# Altium footprint library FootPrintLib_0.PcbLib: 266 footprints (part 10 of 17)
Each footprint in its own frame and in the unit in brackets; x right, y up, seen from the top. Pads: shape width x height; smd on the part's side, far side on the other; paste and mask are expansions set on the pad; w line width, h text height; cw(c..) or ccw(c..) is an arc to the next point about the centre after c.
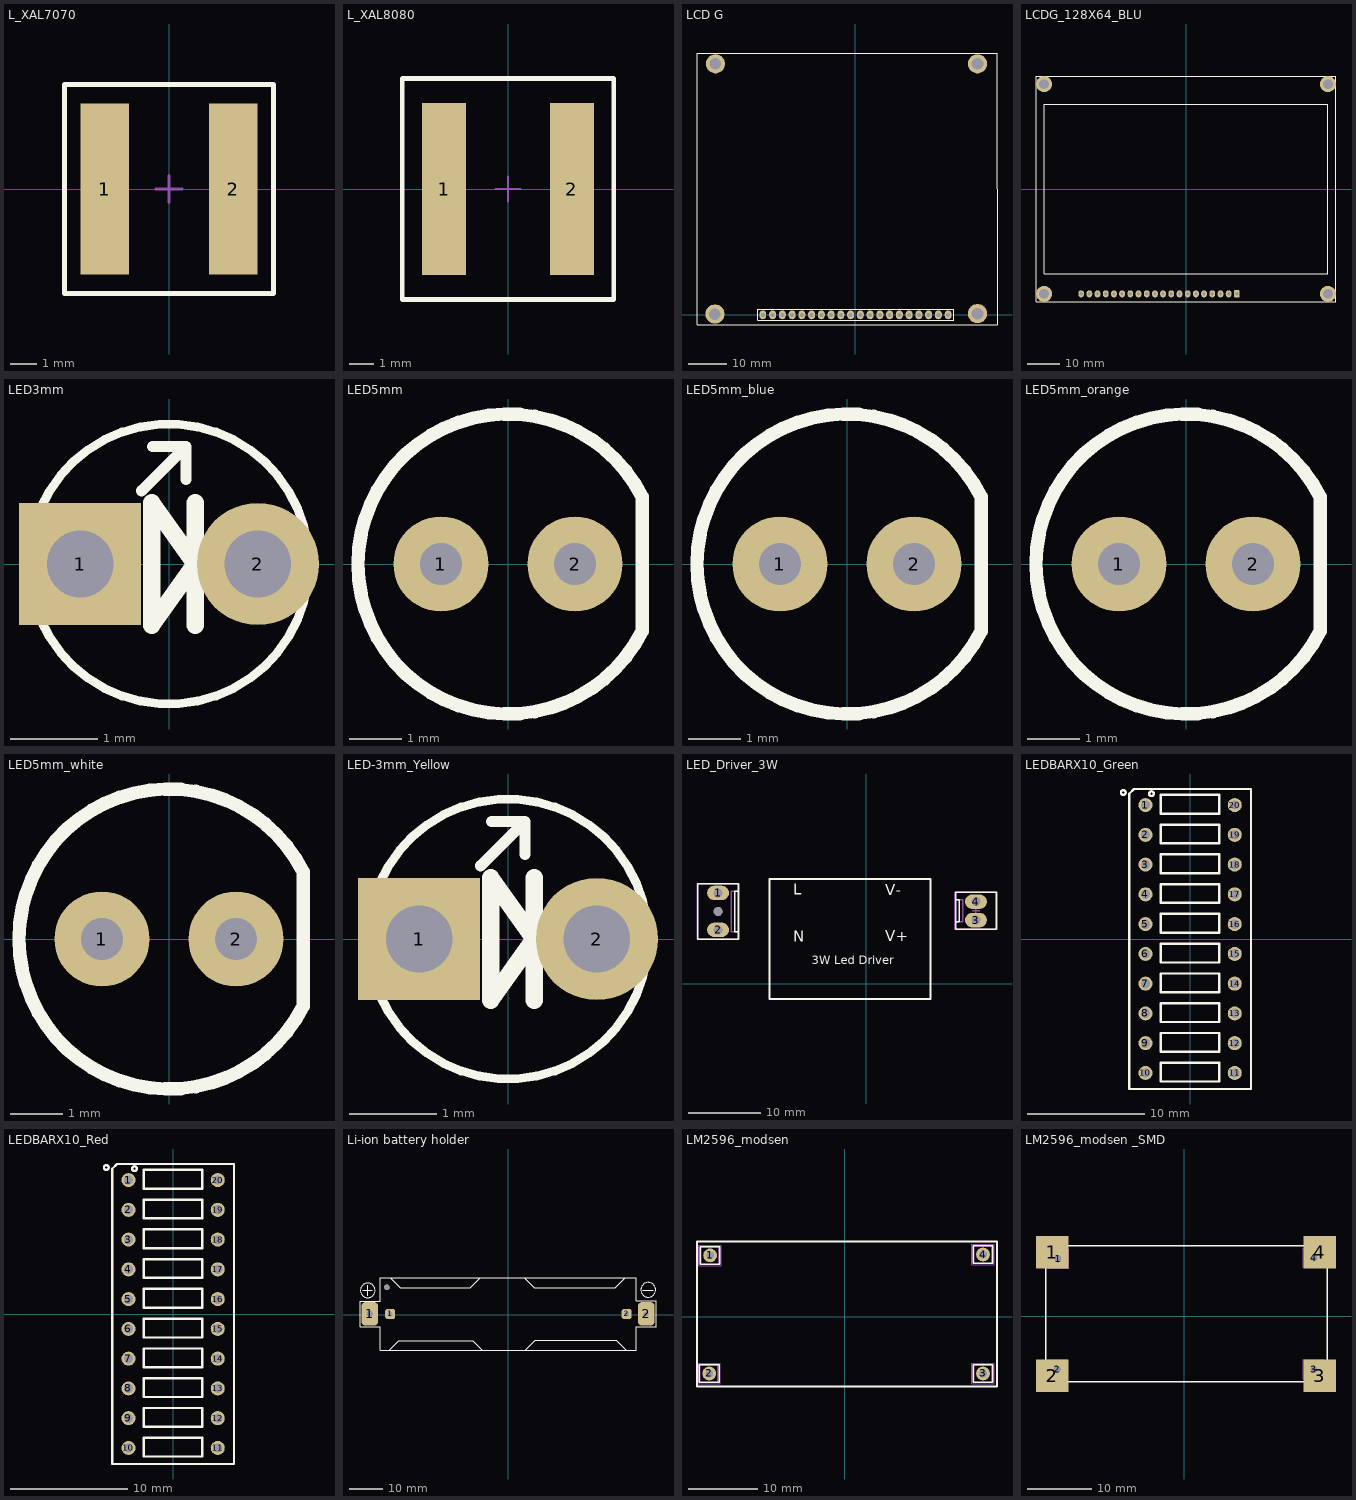
[diagram p9: the footprints below, top view; thin cyan lines are the x and y axes]

## L_XAL7070 [mm] "Inductor, XAL7070, 7.5x7.5x7.0mm"
height 7
pads (2):
  rect 1.8x6.4 smd: 1(-2.4,0) 2(2.4,0)
Top Overlay:
  lines w0.2: -3.9,-3.9 3.9,-3.9 3.9,3.9 -3.9,3.9 -3.9,-3.9
Mechanical 13:
  lines w0.1: -0.5,0 0.5,0 ; 0,-0.5 0,0.5
3D body "Coilcraft-XAL7070.step": height 7, standoff 0, extent -3.85,-4 3.85,4

## L_XAL8080 [mm] "Inductor, XAL8080, 8.1x8.6x8mm"
height 8
pads (2):
  rect 1.8x7 smd: 1(-2.6,0) 2(2.6,0)
Top Overlay:
  lines w0.2: -4.3,-4.5 4.3,-4.5 4.3,4.5 -4.3,4.5 -4.3,-4.5
Mechanical 13:
  lines w0.1: -0.5,0 0.5,0 ; 0,-0.5 0,0.5
3D body "Coilcraft-XAL8080.step": height 8, standoff 0, extent -4.15,-4.4 4.15,4.4

## LCD G [mil]
pads (24):
  oval 70x90 hole 39.37: 1(-950,0) 2(-850,0) 3(-750,0) 4(-650,0) 5(-550,0) 6(-450,0) 7(-350,0) 8(-250,0) 9(-150,0) 10(-50,0) 11(50,0) 12(150,0) 13(250,0) 14(350,0) 15(450,0) 16(550,0) 17(650,0) 18(750,0) 19(850,0) 20(950,0)
  round 196.85 hole 118.11: ""(-1441,8) ""(-1436,2574) ""(1251,13) ""(1251,2574)
Top Overlay:
  lines w7.87: -1000,-55 -1000,55 1005,55 1005,-55 -1000,-55
  lines w10: -1625,-101 1451,-101 1451,2682 -1625,2682 -1625,-101
3D body "User Library-LCD128x64.step": height 566.93, standoff 149.61, extent -1624.69,-87.48 1446.18,2668.42

## LCDG_128X64_BLU [mm] "LCD Graphic Disp, 128X64, TS12864A-2"
pads (24):
  rrect50% 1.8x2.4 hole 1: 1(15.76,-32.5)
  oval 1.8x2.2 hole 1: 2(13.22,-32.5) 3(10.68,-32.5) 4(8.14,-32.5) 5(5.6,-32.5) 6(3.06,-32.5) 7(0.52,-32.5) 8(-2.02,-32.5) 9(-4.56,-32.5) 10(-7.1,-32.5) 11(-9.64,-32.5) 12(-12.18,-32.5) 13(-14.72,-32.5) 14(-17.26,-32.5) 15(-19.8,-32.5) 16(-22.34,-32.5) 17(-24.88,-32.5) 18(-27.42,-32.5) 19(-29.96,-32.5) 20(-32.5,-32.5)
  round 5 hole 3: ""(-44,-32.5) ""(-44,32.5) ""(44,-32.5) ""(44,32.5)
Top Overlay:
  lines w0.2: -46.5,-35 46.5,-35 46.5,35 -46.5,35 -46.5,-35 ; -44,-26.25 44,-26.25 44,26.25 -44,26.25 -44,-26.25
3D body "User Library-WG12864A-1.step": height 14.6, standoff 1, extent -46.5,-35 46.5,35

## LED3mm [mil]
height 157.48
pads (2):
  rect 55x55 hole 30: 1(-40,0)
  round 55 hole 30: 2(40,0)
Top Overlay:
  circle w3.94: c0,0 r62.99
  lines w5: -12.4,32.95 7.6,52.95 ; -7.4,52.95 7.6,52.95 ; 7.6,37.95 7.6,52.95
  lines w7.87: 11.81,-27.56 11.81,27.56 ; -7.87,-27.56 -7.87,27.56 11.81,0 -7.87,-27.56

## LED5mm [mm]
pads (2):
  round 1.8 hole 0.8: 1(-1.27,0) 2(1.27,0)
Top Overlay:
  lines w0.254: 2.54,-1.27 cw(c0,0) 2.54,1.27 2.54,-1.27

## LED5mm_blue [mm]
pads (2):
  round 1.8 hole 0.8: 1(-1.27,0) 2(1.27,0)
Top Overlay:
  lines w0.254: 2.54,-1.27 cw(c0,0) 2.54,1.27 2.54,-1.27
3D body "User Library-LED 5mm Blue.STEP": height 8.72, standoff -2.98, extent -2.758,-2.904 2.642,2.896

## LED5mm_orange [mm]
pads (2):
  round 1.8 hole 0.8: 1(-1.27,0) 2(1.27,0)
Top Overlay:
  lines w0.254: 2.54,-1.27 cw(c0,0) 2.54,1.27 2.54,-1.27
3D body "User Library-LEDd5O.STEP": height 8.66, standoff -6.14, extent -2.753,-3.022 2.667,2.997

## LED5mm_white [mm]
pads (2):
  round 1.8 hole 0.8: 1(-1.27,0) 2(1.27,0)
Top Overlay:
  lines w0.254: 2.54,-1.27 cw(c0,0) 2.54,1.27 2.54,-1.27
3D body "LED.STEP": height 8.35, standoff -6.9, extent -2.772,-2.924 2.678,2.975

## LED-3mm_Yellow [mil]
height 157.48
pads (2):
  rect 55x55 hole 30: 1(-40,0)
  round 55 hole 30: 2(40,0)
Top Overlay:
  circle w3.94: c0,0 r62.99
  lines w5: -12.4,32.95 7.6,52.95 ; -7.4,52.95 7.6,52.95 ; 7.6,37.95 7.6,52.95
  lines w7.87: 11.81,-27.56 11.81,27.56 ; -7.87,-27.56 -7.87,27.56 11.81,0 -7.87,-27.56
3D body "everlight-3MM-LED-YELLOW.step": height 221.91, standoff -272.88, extent -74.8,-79.8 60.07,69.8

## LED_Driver_3W [mm]
pads (5):
  oval 3x2 hole 1.2: 1(-20.398,12.464) 2(-20.398,7.384) 3(15.062,8.738) 4(15.062,11.278)
  round 1.2 hole 1.2: ""(-20.398,9.924)
Top Overlay:
  lines w0.2: -17.604,7.13 -18.112,7.13 -18.112,12.718 -17.604,12.718 ; 12.268,8.484 12.776,8.484 12.776,11.532 12.268,11.532 ; -23.192,6.114 -23.192,13.734 -17.604,13.734 -17.604,6.114 -23.192,6.114 ; 12.268,7.468 17.856,7.468 17.856,12.548 12.268,12.548 12.268,7.468
  lines w0.254: -13.31,-2.108 -13.31,14.376 -2.87,14.376 8.814,14.376 8.814,-2.108 -13.31,-2.108
  text "V+" at 2.591,5.817 h1.52
  text "V-" at 2.591,12.167 h1.52
  text "N" at -10.084,5.766 h1.52
  text "L" at -10.084,12.217 h1.52
  text "3W Led Driver" at -7.491,2.219 h2
Mechanical 13:
  lines w0.2: -17.498,7.13 -18.62,7.13 -18.62,12.718 -17.498,12.718 ; 12.162,8.484 13.284,8.484 13.284,11.532 12.162,11.532 ; -23.298,6.114 -23.298,13.734 -17.498,13.734 -17.498,6.114 -23.298,6.114 ; 12.162,7.468 17.962,7.468 17.962,12.548 12.162,12.548 12.162,7.468
Mechanical 15:
  lines w0.2: -20.906,9.924 -19.89,9.924 ; -20.398,9.416 -20.398,10.432 ; 14.554,10.008 15.57,10.008 ; 15.062,9.5 15.062,10.516
3D body "MOLEX KK 022272021.STEP": height 11.7, standoff -3.56, extent 12.162,7.468 17.962,12.548
3D body "MOLEX KK 022272031.STEP": height 11.7, standoff -3.56, extent -23.298,6.114 -17.498,13.734

## LEDBARX10_Green [mm] "LED BAR GRAPH, pitch: 2.54mm,  CLSRD10A SSA-LXB10HW-GF"
pads (20):
  round 1.2 / inner round 1.2 / far side oval 2x1.2 hole 0.8: 1(-3.81,11.43) 2(-3.81,8.89) 3(-3.81,6.35) 4(-3.81,3.81) 5(-3.81,1.27) 6(-3.81,-1.27) 7(-3.81,-3.81) 8(-3.81,-6.35) 9(-3.81,-8.89) 10(-3.81,-11.43) 11(3.81,-11.43) 12(3.81,-8.89) 13(3.81,-6.35) 14(3.81,-3.81) 15(3.81,-1.27) 16(3.81,1.27) 17(3.81,3.81) 18(3.81,6.35) 19(3.81,8.89) 20(3.81,11.43)
Top Overlay:
  circle w0.2: c-5.7,12.5 r0.2
  circle w0.2: c-3.3,12.4 r0.2
  lines w0.2: -5.2,-12.8 -5.2,12.4 -4.8,12.8 5.2,12.8 5.2,-12.8 -5.2,-12.8 ; -2.5,-12.16 2.5,-12.16 2.5,-10.56 -2.5,-10.56 -2.5,-12.16 ; -2.5,-9.62 2.5,-9.62 2.5,-8.02 -2.5,-8.02 -2.5,-9.62 ; -2.5,-7.08 2.5,-7.08 2.5,-5.48 -2.5,-5.48 -2.5,-7.08 ; -2.5,-4.54 2.5,-4.54 2.5,-2.94 -2.5,-2.94 -2.5,-4.54 ; -2.5,-2 2.5,-2 2.5,-0.4 -2.5,-0.4 -2.5,-2 ; -2.5,0.54 2.5,0.54 2.5,2.14 -2.5,2.14 -2.5,0.54 ; -2.5,3.08 2.5,3.08 2.5,4.68 -2.5,4.68 -2.5,3.08 ; -2.5,5.62 2.5,5.62 2.5,7.22 -2.5,7.22 -2.5,5.62 ; -2.5,8.16 2.5,8.16 2.5,9.76 -2.5,9.76 -2.5,8.16 ; -2.5,10.7 -2.5,12.3 2.5,12.3 2.5,10.7 -2.5,10.7
3D body "LED Bar Graph Green HDSP-4850.step": height 6.1, standoff -2, extent -5.054,-13.182 5.106,12.978

## LEDBARX10_Red [mm] "LED BAR GRAPH, pitch: 2.54mm,  CLSRD10A SSA-LXB10HW-GF"
pads (20):
  round 1.2 / inner round 1.2 / far side oval 2x1.2 hole 0.8: 1(-3.81,11.43) 2(-3.81,8.89) 3(-3.81,6.35) 4(-3.81,3.81) 5(-3.81,1.27) 6(-3.81,-1.27) 7(-3.81,-3.81) 8(-3.81,-6.35) 9(-3.81,-8.89) 10(-3.81,-11.43) 11(3.81,-11.43) 12(3.81,-8.89) 13(3.81,-6.35) 14(3.81,-3.81) 15(3.81,-1.27) 16(3.81,1.27) 17(3.81,3.81) 18(3.81,6.35) 19(3.81,8.89) 20(3.81,11.43)
Top Overlay:
  circle w0.2: c-3.3,12.4 r0.2
  circle w0.2: c-5.7,12.5 r0.2
  lines w0.2: -5.2,-12.8 5.2,-12.8 5.2,12.8 -4.8,12.8 -5.2,12.4 -5.2,-12.8 ; -2.5,-12.16 -2.5,-10.56 2.5,-10.56 2.5,-12.16 -2.5,-12.16 ; -2.5,-9.62 -2.5,-8.02 2.5,-8.02 2.5,-9.62 -2.5,-9.62 ; -2.5,-7.08 -2.5,-5.48 2.5,-5.48 2.5,-7.08 -2.5,-7.08 ; -2.5,-4.54 -2.5,-2.94 2.5,-2.94 2.5,-4.54 -2.5,-4.54 ; -2.5,-2 -2.5,-0.4 2.5,-0.4 2.5,-2 -2.5,-2 ; -2.5,0.54 -2.5,2.14 2.5,2.14 2.5,0.54 -2.5,0.54 ; -2.5,3.08 -2.5,4.68 2.5,4.68 2.5,3.08 -2.5,3.08 ; -2.5,5.62 -2.5,7.22 2.5,7.22 2.5,5.62 -2.5,5.62 ; -2.5,8.16 -2.5,9.76 2.5,9.76 2.5,8.16 -2.5,8.16 ; -2.5,10.7 2.5,10.7 2.5,12.3 -2.5,12.3 -2.5,10.7
3D body "LED Bar Graph 102510 Red.step": height 7.9, standoff -2, extent -5.024,-12.699 5.076,12.801

## Li-ion battery holder [mm]
pads (5):
  rrect50% 5x7 hole 2: 1(-41.148,0.254)
  rrect50% 3x3 hole 1.5: 1(-35.093,0.244) 2(35.079,0.215)
  rrect50% 5x7 hole 1.5: 2(40.894,0.254)
  round 1.6 hole 1.6: ""(-36.068,8.128)
Top Overlay:
  circle w0.1: c-41.762,7.214 r2.192
  circle w0.1: c41.483,7.392 r2.192
  lines w0.3: -43.286,7.214 -40.365,7.214 ; -41.762,5.563 -41.762,8.738 ; -38.1,-10.541 -38.1,-3.632 ; -38.1,-3.607 -44.044,-3.607 -44.044,4.064 -38.1,4.064 -38.1,10.922 ; -38.066,-10.541 37.934,-10.541 ; -38.066,10.959 37.934,10.959 ; -35.316,-10.541 -32.566,-7.791 -10.566,-7.791 -7.816,-10.541 ; -35.066,10.959 -32.066,7.959 -11.316,7.959 -8.316,10.959 ; 4.684,10.959 7.684,7.959 31.684,7.959 34.684,10.959 ; 4.934,-10.541 7.934,-7.541 31.934,-7.541 34.934,-10.541 ; 37.948,-10.516 37.948,-3.607 ; 37.948,-3.581 43.891,-3.581 43.891,4.089 37.948,4.089 37.948,10.947 ; 39.878,7.315 43.053,7.315
3D body "keystone-PN1042.STEP": height 14.86, standoff -3.43, extent -43.002,-10.071 43.002,10.579
3D body "18650 battery.STEP": height 19.65, standoff 1.65, extent -32.449,-8.941 32.551,9.034

## LM2596_modsen [mm]
pads (4):
  round 2 hole 1.1: 1(-19.558,8.89) 2(-19.685,-8.255) 3(20.066,-8.255) 4(20.066,9.017)
Top Overlay:
  lines w0.2: -21.105,-9.525 -18.265,-9.525 -18.265,-6.985 -21.105,-6.985 -21.105,-9.525 ; -20.978,7.62 -18.138,7.62 -18.138,10.16 -20.978,10.16 -20.978,7.62 ; 18.646,-9.525 21.486,-9.525 21.486,-6.985 18.646,-6.985 18.646,-9.525 ; 18.646,7.747 21.486,7.747 21.486,10.287 18.646,10.287 18.646,7.747
  lines w0.254: -21.463,-10.16 22.098,-10.16 22.098,10.472 22.098,10.922 -14.155,10.922 ; -21.463,-10.033 -21.463,10.922 -13.716,10.922 ; -14.478,10.922 -14.224,10.922
Mechanical 11:
  lines w0.1: -20.955,-9.525 -18.415,-9.525 -18.415,-6.985 -20.955,-6.985 -20.955,-9.525 ; -20.828,7.62 -18.288,7.62 -18.288,10.16 -20.828,10.16 -20.828,7.62 ; 18.796,-9.525 21.336,-9.525 21.336,-6.985 18.796,-6.985 18.796,-9.525 ; 18.796,7.747 21.336,7.747 21.336,10.287 18.796,10.287 18.796,7.747
Mechanical 13:
  lines w0.1: -21.105,-9.525 -18.265,-9.525 -18.265,-6.985 -21.105,-6.985 -21.105,-9.525 ; -20.978,7.62 -18.138,7.62 -18.138,10.16 -20.978,10.16 -20.978,7.62 ; 18.646,-9.525 21.486,-9.525 21.486,-6.985 18.646,-6.985 18.646,-9.525 ; 18.646,7.747 21.486,7.747 21.486,10.287 18.646,10.287 18.646,7.747
Mechanical 15:
  lines w0.1: -20.185,-8.255 -19.185,-8.255 ; -20.058,8.89 -19.058,8.89 ; -19.685,-8.755 -19.685,-7.755 ; -19.558,8.39 -19.558,9.39 ; 19.566,-8.255 20.566,-8.255 ; 19.566,9.017 20.566,9.017 ; 20.066,-8.755 20.066,-7.755 ; 20.066,8.517 20.066,9.517 ; -21.305,-9.725 -18.065,-9.725 -18.065,-6.785 -21.305,-6.785 -21.305,-9.725 ; -21.178,7.42 -17.938,7.42 -17.938,10.36 -21.178,10.36 -21.178,7.42 ; 18.446,-9.725 21.686,-9.725 21.686,-6.785 18.446,-6.785 18.446,-9.725 ; 18.446,7.547 21.686,7.547 21.686,10.487 18.446,10.487 18.446,7.547
3D body "User Library-DC-DC MODULE LM2596s.STEP": height 16.91, standoff 3.1, extent -21.496,-10.119 22.004,10.881
3D body "61300111121.stp": height 8.77, standoff -2.77, extent 18.796,-9.525 21.336,-6.985
3D body "61300111121.stp": height 8.77, standoff -2.77, extent 18.796,7.747 21.336,10.287
3D body "61300111121.stp": height 8.77, standoff -2.77, extent -20.828,7.62 -18.288,10.16
3D body "61300111121.stp": height 8.77, standoff -2.77, extent -20.955,-9.525 -18.415,-6.985

## LM2596_modsen _SMD [mm]
pads (8):
  rect 5x5 smd: 1(-20.472,9.881) 2(-20.472,-9.22) 3(20.98,-9.22) 4(20.98,9.881)
  round 2 hole 1.1: 1(-19.558,8.89) 2(-19.685,-8.255) 3(20.066,-8.255) 4(20.066,9.017)
Top Overlay:
  lines w0.254: -21.463,-10.16 22.098,-10.16 22.098,10.472 22.098,10.922 -14.155,10.922 ; -21.463,-10.033 -21.463,10.922 -13.716,10.922 ; -14.478,10.922 -14.224,10.922
Mechanical 11:
  lines w0.1: -20.955,-9.525 -20.955,-6.985 -18.415,-6.985 -18.415,-9.525 ; -20.828,7.62 -20.828,10.16 ; -18.288,7.62 -18.288,10.16 ; 18.796,-9.525 18.796,-6.985 ; 18.796,7.747 18.796,10.287 21.336,10.287 21.336,7.747 ; 21.336,-9.525 21.336,-6.985
Mechanical 13:
  lines w0.1: -21.105,-6.985 -18.265,-6.985 ; 18.646,-9.525 21.486,-9.525 21.486,-6.985 ; 21.486,7.747 18.646,7.747 18.646,10.287 21.486,10.287
Mechanical 15:
  lines w0.1: -20.185,-8.255 -19.185,-8.255 ; -20.058,8.89 -19.058,8.89 ; -19.685,-8.755 -19.685,-7.755 ; -19.558,8.39 -19.558,9.39 ; 19.566,-8.255 20.566,-8.255 ; 19.566,9.017 20.566,9.017 ; 20.066,-8.755 20.066,-7.755 ; 20.066,8.517 20.066,9.517 ; -21.305,-9.725 -21.305,-6.785 -18.065,-6.785 -18.065,-9.725 -21.305,-9.725 ; -21.178,7.42 -21.178,10.36 -17.938,10.36 -17.938,7.42 -21.178,7.42 ; 18.446,-9.725 18.446,-6.785 21.686,-6.785 21.686,-9.725 18.446,-9.725 ; 18.446,7.547 18.446,10.487 21.686,10.487 21.686,7.547 18.446,7.547
3D body "User Library-DC-DC MODULE LM2596s.STEP": height 13.11, standoff -0.7, extent -21.496,-10.119 22.004,10.881